# EAGLE library part LGS5116B (library pixel)
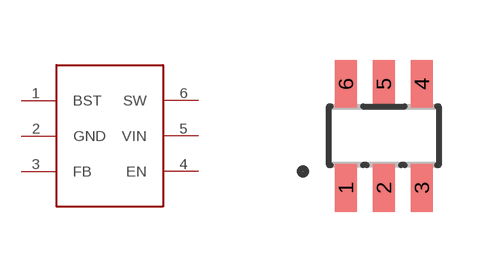
[diagram p38: symbol with the pads of SOT23-6; footprint SOT23-6]

Designator prefix -

## LGS5116B  [SOT23-6]
1  BST
2  GND
3  FB
4  EN
5  VIN
6  SW

## Footprint SOT23-6 (pad centres in mm)
6-Lead Small Outline Transistor Package SOT-23-6 Source: http://www.analog.com/UploadedFiles/Data_Sheets/346131962AD8067_a.pdf
smd 0.55 x 1.2: 1 -0.95,-1.3; 2 0,-1.3; 3 0.95,-1.3; 4 0.95,1.3; 5 0,1.3; 6 -0.95,1.3